# Altium footprint library SI2319CDS-T1-GE3.PcbLib: 3 footprints
Each footprint in its own frame and in the unit in brackets; x right, y up, seen from the top. Pads: shape width x height; smd on the part's side, far side on the other; paste and mask are expansions set on the pad; w line width, h text height; cw(c..) or ccw(c..) is an arc to the next point about the centre after c.
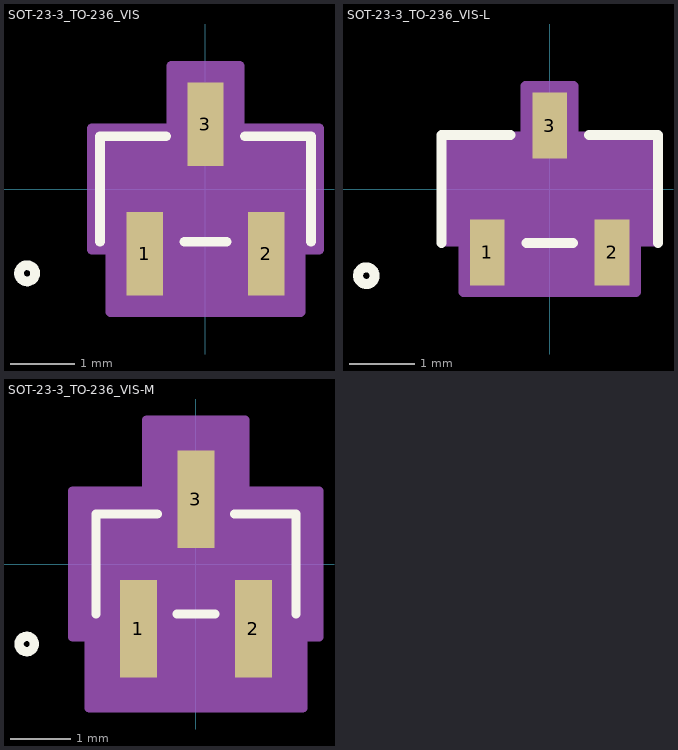
[diagram p0: the footprints below, top view; thin cyan lines are the x and y axes]

## SOT-23-3_TO-236_VIS [mil]
pads (3):
  rect 22.36x51.56 smd paste+0 mask+0: 1(-37.4,-40) 2(37.4,-40) 3(0,40)
Top Overlay:
  circle w6: c-110,-52 r5
  lines w6: -65,-32.5 -65,32.5 -24.28,32.5 ; -13.12,-32.5 13.12,-32.5 ; 24.28,32.5 65,32.5 65,-32.5
  text ".Designator" at -137.5,-25 h50
Mechanical 13:
  circle w1: c-50,-17.5 r5
  lines w1: -60,-27.5 60,-27.5 60,27.5 -60,27.5 -60,-27.5 ; -47.4,-52 -47.4,-27.5 -27.4,-27.5 -27.4,-52 -47.4,-52 ; -10,27.5 10,27.5 10,52 -10,52 -10,27.5 ; 27.4,-52 27.4,-27.5 47.4,-27.5 47.4,-52 27.4,-52
  text ".Designator" at -137.5,-25 h50
Mechanical 15:
  region: -70,-37.5 -70,37.5 -21.18,37.5 -21.18,75.78 21.18,75.78 21.18,37.5 70,37.5 70,-37.5 58.58,-37.5 58.58,-75.78 -58.58,-75.78 -58.58,-37.5
  region: 60,-27.5 -60,-27.5 -60,27.5 60,27.5
  lines w6: -70,-37.5 -70,37.5 -21.18,37.5 -21.18,75.78 21.18,75.78 21.18,37.5 70,37.5 70,-37.5 58.58,-37.5 58.58,-75.78 -58.58,-75.78 -58.58,-37.5 -70,-37.5
3D body "SOT-23-3_TO-236_VIS.step": height 44.09, standoff 0, extent -60,-52.01 60,52.01

## SOT-23-3_TO-236_VIS-L [mm]
pads (3):
  rect 0.528x1.01 smd paste+0 mask+0: 1(-0.95,-0.966) 2(0.95,-0.966) 3(0,0.966)
Top Overlay:
  circle w0.152: c-2.794,-1.321 r0.127
  lines w0.152: -1.651,-0.826 -1.651,0.826 -0.597,0.826 ; -0.353,-0.826 0.353,-0.826 ; 0.597,0.826 1.651,0.826 1.651,-0.826
  text ".Designator" at -3.492,-0.635 h1.27
Mechanical 13:
  circle w0.025: c-1.27,-0.445 r0.127
  lines w0.025: -1.524,-0.699 1.524,-0.699 1.524,0.699 -1.524,0.699 -1.524,-0.699 ; -1.204,-1.321 -1.204,-0.699 -0.696,-0.699 -0.696,-1.321 -1.204,-1.321 ; -0.254,0.699 0.254,0.699 0.254,1.321 -0.254,1.321 -0.254,0.699 ; 0.696,-1.321 0.696,-0.699 1.204,-0.699 1.204,-1.321 0.696,-1.321
  text ".Designator" at -3.492,-0.635 h1.27
Mechanical 15:
  region: -1.626,-0.8 -1.626,0.8 -0.366,0.8 -0.366,1.572 0.366,1.572 0.366,0.8 1.626,0.8 1.626,-0.8 1.316,-0.8 1.316,-1.572 -1.316,-1.572 -1.316,-0.8
  region: 1.524,-0.699 -1.524,-0.699 -1.524,0.699 1.524,0.699
  lines w0.152: -1.626,-0.8 -1.626,0.8 -0.366,0.8 -0.366,1.572 0.366,1.572 0.366,0.8 1.626,0.8 1.626,-0.8 1.316,-0.8 1.316,-1.572 -1.316,-1.572 -1.316,-0.8 -1.626,-0.8
3D body "SOT-23-3_TO-236_VIS.step": height 1.12, standoff 0, extent -1.524,-1.321 1.524,1.321

## SOT-23-3_TO-236_VIS-M [mm]
pads (3):
  rect 0.608x1.61 smd paste+0 mask+0: 1(-0.95,-1.066) 2(0.95,-1.066) 3(0,1.066)
Top Overlay:
  circle w0.152: c-2.794,-1.321 r0.127
  lines w0.152: -1.651,-0.826 -1.651,0.826 -0.637,0.826 ; -0.313,-0.826 0.313,-0.826 ; 0.637,0.826 1.651,0.826 1.651,-0.826
  text ".Designator" at -3.492,-0.635 h1.27
Mechanical 13:
  circle w0.025: c-1.27,-0.445 r0.127
  lines w0.025: -1.524,-0.699 1.524,-0.699 1.524,0.699 -1.524,0.699 -1.524,-0.699 ; -1.204,-1.321 -1.204,-0.699 -0.696,-0.699 -0.696,-1.321 -1.204,-1.321 ; -0.254,0.699 0.254,0.699 0.254,1.321 -0.254,1.321 -0.254,0.699 ; 0.696,-1.321 0.696,-0.699 1.204,-0.699 1.204,-1.321 0.696,-1.321
  text ".Designator" at -3.492,-0.635 h1.27
Mechanical 15:
  region: -2.032,-1.206 -2.032,1.206 -0.812,1.206 -0.812,2.379 0.812,2.379 0.812,1.206 2.032,1.206 2.032,-1.206 1.762,-1.206 1.762,-2.379 -1.762,-2.379 -1.762,-1.206
  region: 1.524,-0.699 -1.524,-0.699 -1.524,0.699 1.524,0.699
  lines w0.152: -2.032,-1.206 -2.032,1.206 -0.812,1.206 -0.812,2.379 0.812,2.379 0.812,1.206 2.032,1.206 2.032,-1.206 1.762,-1.206 1.762,-2.379 -1.762,-2.379 -1.762,-1.206 -2.032,-1.206
3D body "SOT-23-3_TO-236_VIS.step": height 1.12, standoff 0, extent -1.524,-1.321 1.524,1.321